# EAGLE library part MPU6500-MODULE (library moto-core)
MPU6500-MODULE GY-6500 MPU-6500 / MPU-6590 IMU karti (SPI/I2C). Board C1 (M4, SPI) / Board C2 (M7, I2C), rijit montaj. Kart: 15.0 x 25.0 mm - Guven: M STEP: GrabCAD 'GY-6500' / 'GY-521' (ayni form)
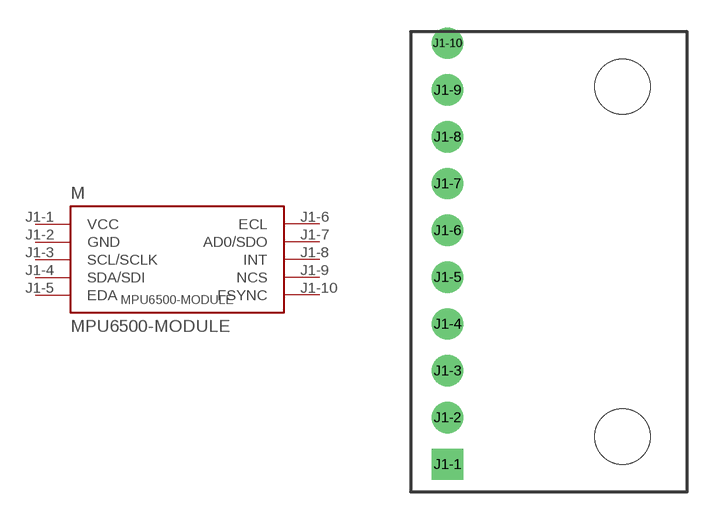
[diagram p5: symbol with the pads of MPU6500-MODULE; footprint MPU6500-MODULE]

Designator prefix M

## MPU6500-MODULE (BOARD_SIZE: 15.0x25.0mm; CONFIDENCE: M)  [MPU6500-MODULE]
J1-1  VCC  pas
J1-2  GND  pas
J1-3  SCL/SCLK  pas
J1-4  SDA/SDI  pas
J1-5  EDA  pas
J1-6  ECL  pas
J1-7  AD0/SDO  pas
J1-8  INT  pas
J1-9  NCS  pas
J1-10  FSYNC  pas

## Footprint MPU6500-MODULE (pad centres in mm)
GY-6500 MPU-6500 / MPU-6590 IMU karti (SPI/I2C). Board C1 (M4, SPI) / Board C2 (M7, I2C), rijit montaj. | Kart: 15.0 x 25.0 mm | Guven: M
drill 1 pad 1.7 square: J1-1 -5.5,-11
drill 1 pad 1.7 round: J1-2 -5.5,-8.46; J1-3 -5.5,-5.92; J1-4 -5.5,-3.38; J1-5 -5.5,-0.84; J1-6 -5.5,1.7; J1-7 -5.5,4.24; J1-8 -5.5,6.78; J1-9 -5.5,9.32; J1-10 -5.5,11.86
hole 3 at 4,-9.5
hole 3 at 4,9.5